# Altium footprint library MY_LIB_TestPoints.PcbLib: 3 footprints
Each footprint in its own frame and in the unit in brackets; x right, y up, seen from the top. Pads: shape width x height; smd on the part's side, far side on the other; paste and mask are expansions set on the pad; w line width, h text height; cw(c..) or ccw(c..) is an arc to the next point about the centre after c.
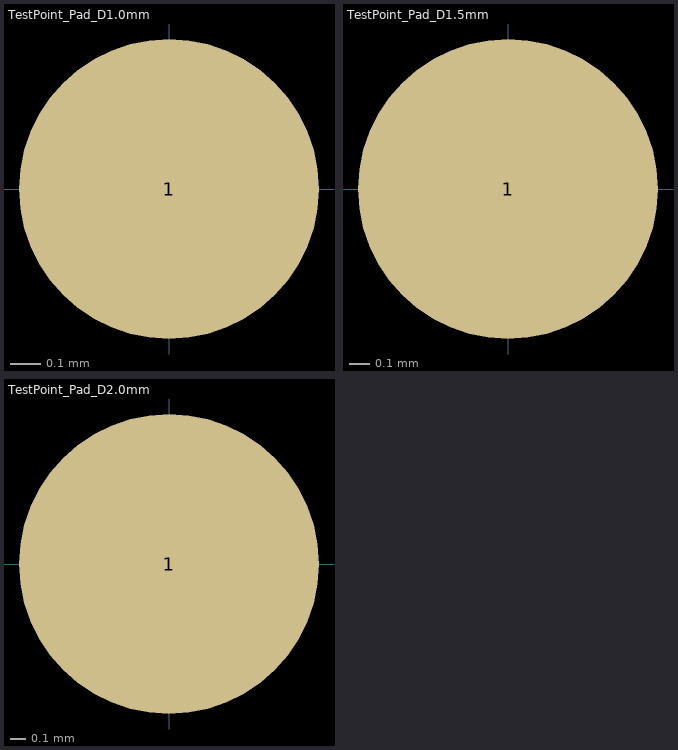
[diagram p0: the footprints below, top view; thin cyan lines are the x and y axes]

## TestPoint_Pad_D1.0mm [mm] "Test point; round copper pad D1.0mm; exposed mask; no paste, drill or silkscreen; Standard (No BOM)"
pads (1):
  round 1 smd paste-1 mask+0.05: 1(0,0)

## TestPoint_Pad_D1.5mm [mm] "Test point; round copper pad D1.5mm; exposed mask; no paste, drill or silkscreen; Standard (No BOM)"
pads (1):
  round 1.5 smd paste-1.5 mask+0.05: 1(0,0)

## TestPoint_Pad_D2.0mm [mm] "Test point; round copper pad D2.0mm; exposed mask; no paste, drill or silkscreen; Standard (No BOM)"
pads (1):
  round 2 smd paste-2 mask+0.05: 1(0,0)